# Altium footprint library flight_controller_footprint_lib.PcbLib: 48 footprints (part 3 of 3)
Each footprint in its own frame and in the unit in brackets; x right, y up, seen from the top. Pads: shape width x height; smd on the part's side, far side on the other; paste and mask are expansions set on the pad; w line width, h text height; cw(c..) or ccw(c..) is an arc to the next point about the centre after c.
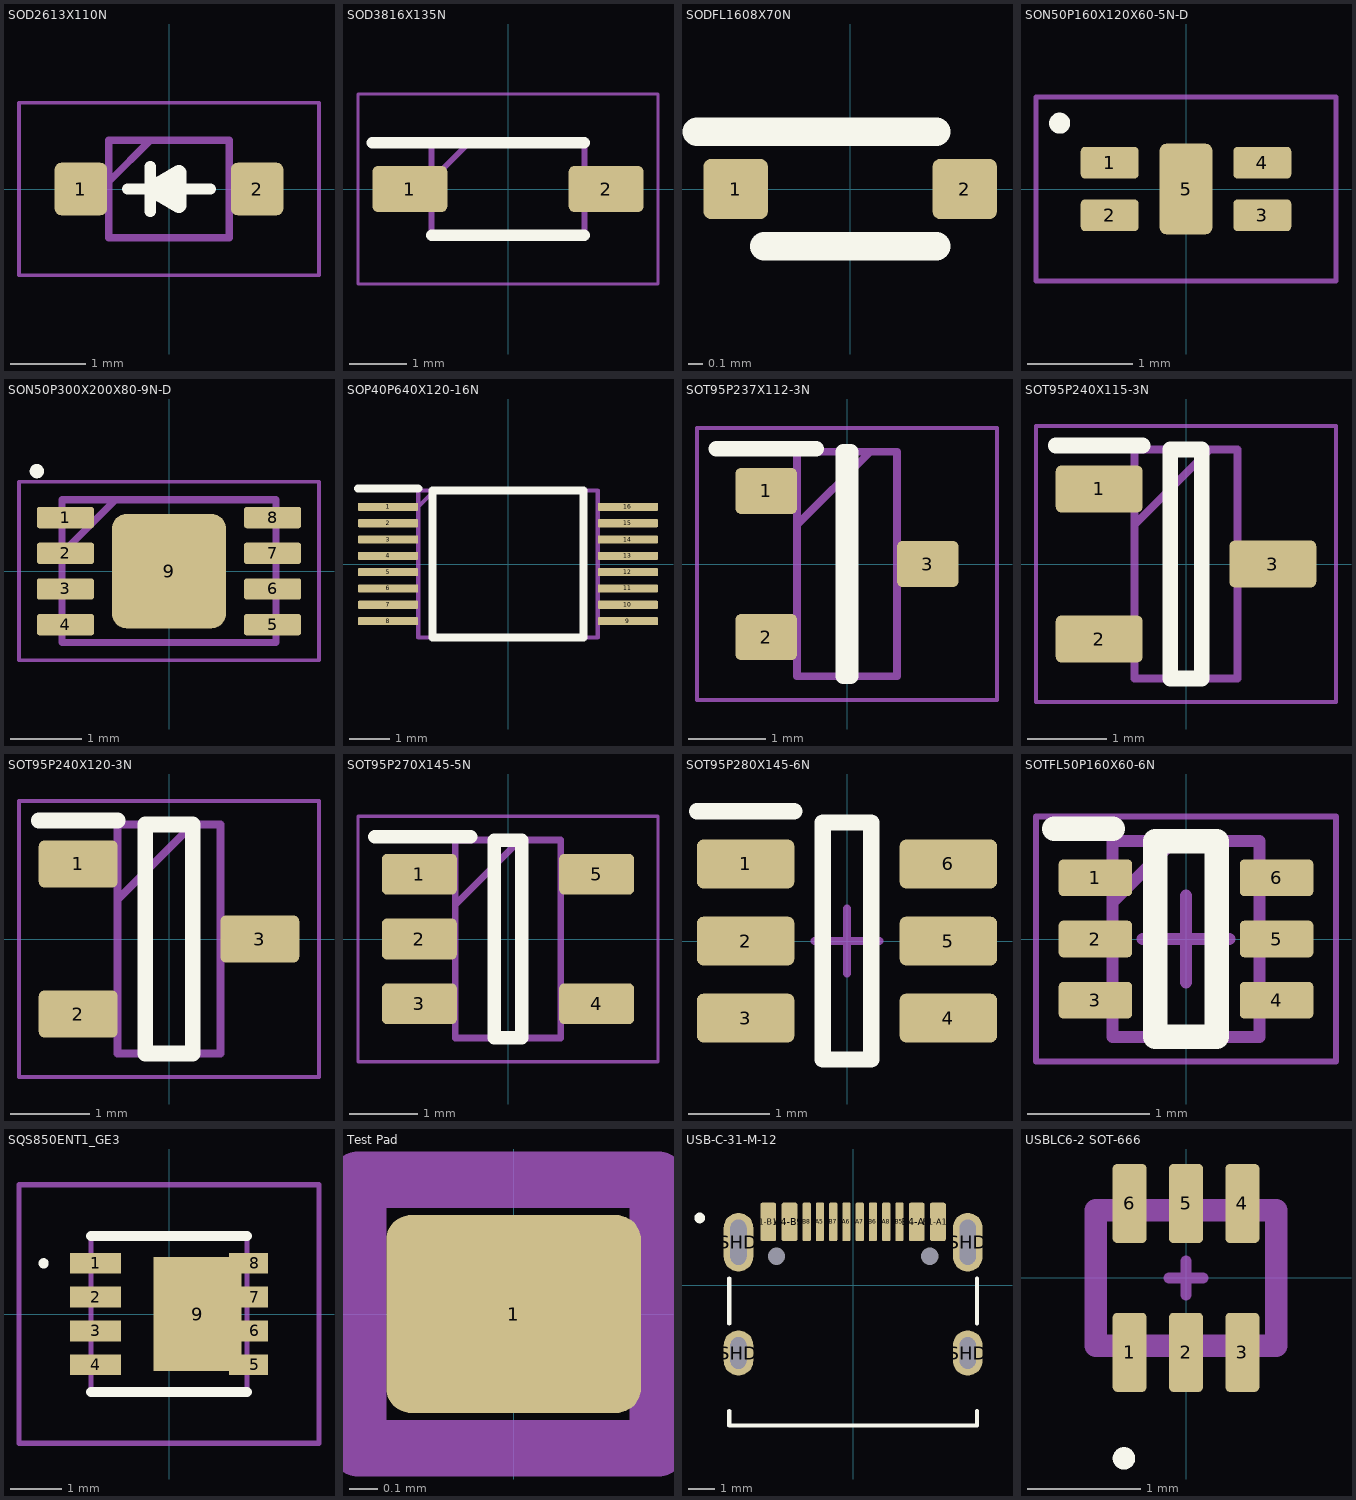
[diagram p2: the footprints below, top view; thin cyan lines are the x and y axes]

## SOD2613X110N [mm]
pads (2):
  rrect25% 0.7x0.7 smd: 1(-1.175,0) 2(1.175,0)
Top Overlay:
  lines w0.15: -0.55,0 0.55,0 ; -0.25,-0.3 -0.25,0.3
  lines w0.2: -0.25,0 0.137,0.223 0.137,-0.223 -0.25,0
Top Assembly:
  lines w0.1: -0.8,0.1 -0.25,0.65 ; -0.8,-0.65 0.8,-0.65 0.8,0.65 -0.8,0.65 -0.8,-0.65
Top Courtyard:
  lines w0.05: -2,-1.15 -2,1.15 2,1.15 2,-1.15 -2,-1.15
Top Designator:
  text ".Designator" at -3.749,-0.25 h0.75
3D body "1N5817WS.stp": height 1.1, standoff 0, extent -1.325,-0.65 1.325,0.65

## SOD3816X135N [mm]
pads (2):
  rrect25% 1.3x0.8 smd: 1(-1.7,0) 2(1.7,0)
Top Overlay:
  lines w0.2: -2.35,0.8 1.325,0.8 ; -1.325,-0.8 1.325,-0.8
Top Assembly:
  lines w0.1: -1.325,0.15 -0.675,0.8 ; -1.325,-0.8 1.325,-0.8 1.325,0.8 -1.325,0.8 -1.325,-0.8
Top Courtyard:
  lines w0.05: -2.6,-1.65 2.6,-1.65 2.6,1.65 -2.6,1.65 -2.6,-1.65
Top Designator:
  text ".Designator" at -3.749,-0.25 h0.75
3D body "1N4148W_R2_00001.stp": height 1.35, standoff 0, extent -1.875,-0.8 1.875,0.8

## SODFL1608X70N [mm]
pads (2):
  rrect25% 0.45x0.42 smd: 1(-0.8,0) 2(0.8,0)
Top Overlay:
  lines w0.2: -1.07,0.4 0.6,0.4 ; -0.6,-0.4 0.6,-0.4
Top Designator:
  text ".Designator" at -3.749,-0.25 h0.75
3D body "1N4148WT.stp": height 0.7, standoff 0, extent -0.8,-0.4 0.8,0.4

## SON50P160X120X60-5N-D [mm]
pads (5):
  rrect25% 0.55x0.3 smd: 1(-0.725,0.25) 2(-0.725,-0.25) 3(0.725,-0.25) 4(0.725,0.25)
  rrect25% 0.5x0.86 smd: 5(0,0)
Top Overlay:
  circle w0.1: c-1.2,0.625 r0.05
Top Courtyard:
  lines w0.05: -1.425,-0.875 -1.425,0.875 1.425,0.875 1.425,-0.875 -1.425,-0.875
Top Designator:
  text ".Designator" at -3.749,-0.25 h0.75
3D body "SIP32431DNP3-T1GE4.stp": height 0.6, standoff 0, extent -0.8,-0.6 0.8,0.6

## SON50P300X200X80-9N-D [mm]
pads (9):
  rrect25% 0.8x0.3 smd: 1(-1.45,0.75) 2(-1.45,0.25) 3(-1.45,-0.25) 4(-1.45,-0.75) 5(1.45,-0.75) 6(1.45,-0.25) 7(1.45,0.25) 8(1.45,0.75)
  rrect25% 1.6x1.6 smd: 9(0,0)
Top Overlay:
  circle w0.1: c-1.85,1.4 r0.05
Top Assembly:
  lines w0.1: -1.5,0.25 -0.75,1 ; -1.5,-1 1.5,-1 1.5,1 -1.5,1 -1.5,-1
Top Courtyard:
  lines w0.05: -2.1,-1.25 -2.1,1.25 2.1,1.25 2.1,-1.25 -2.1,-1.25
Top Designator:
  text ".Designator" at -3.749,-0.137 h0.75
3D body "24AA64FT-I_MNY.stp": height 0.8, standoff 0, extent -1.55,-1 1.55,1

## SOP40P640X120-16N [mm]
pads (16):
  rrect25% 1.475x0.2 smd: 1(-2.938,1.4) 2(-2.938,1) 3(-2.938,0.6) 4(-2.938,0.2) 5(-2.938,-0.2) 6(-2.938,-0.6) 7(-2.938,-1) 8(-2.938,-1.4) 9(2.938,-1.4) 10(2.938,-1) 11(2.938,-0.6) 12(2.938,-0.2) 13(2.938,0.2) 14(2.938,0.6) 15(2.938,1) 16(2.938,1.4)
Top Overlay:
  lines w0.2: -3.675,1.85 -2.2,1.85 ; -1.85,-1.8 -1.85,1.8 1.85,1.8 1.85,-1.8 -1.85,-1.8
Top Assembly:
  lines w0.1: -2.2,1.4 -1.8,1.8 ; -2.2,-1.8 -2.2,1.8 2.2,1.8 2.2,-1.8 -2.2,-1.8
Top Designator:
  text ".Designator" at -3.749,-0.25 h0.75
3D body "PCA9534ADGVR.stp": height 1.13, standoff 0, extent -3.2,-1.8 3.2,1.8

## SOT95P237X112-3N [mm]
pads (3):
  rrect25% 0.8x0.6 smd: 1(-1.05,0.95) 2(-1.05,-0.95) 3(1.05,0)
Top Overlay:
  lines w0.2: -1.7,1.5 -0.4,1.5 ; -0.05,-1.46 -0.05,1.46 0.05,1.46 0.05,-1.46 -0.05,-1.46
Top Assembly:
  lines w0.1: -0.65,0.51 0.3,1.46 ; -0.65,-1.46 -0.65,1.46 0.65,1.46 0.65,-1.46 -0.65,-1.46
Top Courtyard:
  lines w0.05: -1.95,-1.77 1.95,-1.77 1.95,1.77 -1.95,1.77 -1.95,-1.77
Top Designator:
  text ".Designator" at -3.749,-0.25 h0.75
3D body "SI2302DDS-T1-GE3.stp": height 1.12, standoff 0, extent -1.185,-1.46 1.185,1.46

## SOT95P240X115-3N [mm]
pads (3):
  rrect25% 1.1x0.6 smd: 1(-1.1,0.95) 2(-1.1,-0.95) 3(1.1,0)
Top Overlay:
  lines w0.2: -1.65,1.5 -0.55,1.5 ; -0.2,-1.45 0.2,-1.45 0.2,1.45 -0.2,1.45 -0.2,-1.45
Top Assembly:
  lines w0.1: -0.65,0.5 0.3,1.45 ; -0.65,-1.45 0.65,-1.45 0.65,1.45 -0.65,1.45 -0.65,-1.45
Top Courtyard:
  lines w0.05: -1.9,-1.75 1.9,-1.75 1.9,1.75 -1.9,1.75 -1.9,-1.75
Top Designator:
  text ".Designator" at -3.749,-0.25 h0.75
3D body "SS8050-HF.stp": height 1.15, standoff 0, extent -1.2,-1.45 1.2,1.45

## SOT95P240X120-3N [mm]
pads (3):
  rrect25% 1x0.6 smd: 1(-1.15,0.95) 2(-1.15,-0.95) 3(1.15,0)
Top Overlay:
  lines w0.2: -1.65,1.5 -0.65,1.5 ; -0.3,-1.45 0.3,-1.45 0.3,1.45 -0.3,1.45 -0.3,-1.45
Top Assembly:
  lines w0.1: -0.65,0.5 0.3,1.45 ; -0.65,-1.45 -0.65,1.45 0.65,1.45 0.65,-1.45 -0.65,-1.45
Top Courtyard:
  lines w0.05: -1.9,-1.75 1.9,-1.75 1.9,1.75 -1.9,1.75 -1.9,-1.75
3D body "BAT54.stp": height 1.1, standoff -0.1, extent -1.2,-1.45 1.2,1.45

## SOT95P270X145-5N [mm]
pads (5):
  rrect25% 1.1x0.6 smd: 1(-1.3,0.95) 2(-1.3,0) 3(-1.3,-0.95) 4(1.3,-0.95) 5(1.3,0.95)
Top Overlay:
  lines w0.2: -1.95,1.5 -0.55,1.5 ; -0.2,-1.45 0.2,-1.45 0.2,1.45 -0.2,1.45 -0.2,-1.45
Top Assembly:
  lines w0.1: -0.775,0.5 0.175,1.45 ; -0.775,-1.45 0.775,-1.45 0.775,1.45 -0.775,1.45 -0.775,-1.45
Top Courtyard:
  lines w0.05: -2.2,-1.8 2.2,-1.8 2.2,1.8 -2.2,1.8 -2.2,-1.8
Top Designator:
  text ".Designator" at -3.749,-0.25 h0.75
3D body "24AA64FT-I_OT.stp": height 1.45, standoff 0, extent -1.35,-1.45 1.35,1.45

## SOT95P280X145-6N [mm]
pads (6):
  rrect25% 1.2x0.6 smd: 1(-1.25,0.95) 2(-1.25,0) 3(-1.25,-0.95) 4(1.25,-0.95) 5(1.25,0) 6(1.25,0.95)
Top Overlay:
  lines w0.2: -1.85,1.6 -0.65,1.6 ; -0.3,-1.462 0.3,-1.462 0.3,1.462 -0.3,1.462 -0.3,-1.462
Top Assembly:
  lines w0.1: -0.4,0 0,0 ; 0,-0.4 0,0 ; 0,0.4 0,0 ; 0.4,0 0,0
Top Designator:
  text ".Designator" at -3.749,-0.181 h0.75
3D body "USBLC6-2SC6.stp": height 1.45, standoff 0, extent -1.4,-1.462 1.4,1.462

## SOTFL50P160X60-6N [mm]
pads (6):
  rrect25% 0.6x0.3 smd: 1(-0.74,0.5) 2(-0.74,0) 3(-0.74,-0.5) 4(0.74,-0.5) 5(0.74,0) 6(0.74,0.5)
Top Overlay:
  lines w0.2: -1.075,0.9 -0.6,0.9 ; -0.25,-0.8 0.25,-0.8 0.25,0.8 -0.25,0.8 -0.25,-0.8
Top Assembly:
  lines w0.1: -0.6,0.3 -0.1,0.8 ; -0.354,0 0.354,0 ; 0,-0.354 0,0.354 ; -0.6,-0.8 -0.6,0.8 0.6,0.8 0.6,-0.8 -0.6,-0.8
Top Courtyard:
  lines w0.05: -1.225,-1 1.225,-1 1.225,1 -1.225,1 -1.225,-1
Top Designator:
  text ".Designator" at -3.749,-0.25 h0.75
3D body "SN74LVC1G3157DRLR.stp": height 0.6, standoff 0, extent -0.8,-0.8 0.8,0.8

## SQS850ENT1_GE3 [mm]
pads (11):
  rect 0.99x0.405 smd: 1(-1.435,0.99) 2(-1.435,0.33) 3(-1.435,-0.33) 4(-1.435,-0.99)
  rect 0.51x0.405 smd: 5(1.675,-0.99) 6(1.675,-0.33) 7(1.675,0.33) 8(1.675,0.99)
  rect 1.725x2.235 smd: 9(0.557,0)
  rect 0.25x0.077 smd: 10(1.295,-1.156) 11(1.295,1.156)
Top Overlay:
  lines w0.1: -2.5,0.99 ccw(c-2.45,0.99) -2.4,0.99 ccw(c-2.45,0.99) -2.5,0.99
  lines w0.2: -1.525,-1.525 1.525,-1.525 ; -1.525,1.525 1.525,1.525
Top Assembly:
  lines w0.1: -1.525,-1.525 1.525,-1.525 1.525,1.525 -1.525,1.525 -1.525,-1.525
Top Courtyard:
  lines w0.1: -2.93,-2.525 2.93,-2.525 2.93,2.525 -2.93,2.525 -2.93,-2.525
Top Designator:
  text ".Designator" at -3.749,-0.25 h0.75
3D body "SISH615ADN-T1-GE3.stp": height 1.17, standoff 0, extent -1.65,-1.65 1.65,1.65

## Test Pad [mm] "Size of 1005[0402] resistor pad size"
height 0.4
pads (1):
  rrect25% 0.9x0.7 smd paste-2539.97: 1(0,0)
Top Assembly:
  lines w0.2: -0.55,-0.475 0.51,-0.475 0.51,0.475 -0.55,0.475 -0.55,-0.475

## USB-C-31-M-12 [mm]
pads (18):
  round 0 hole 0.65: 17(-2.89,1.102) 18(2.89,1.102)
  rrect25% 0.6x1.448 smd paste+0 mask+0.1: A1-B12(-3.2,2.4) A4-B9(-2.4,2.4) B1-A12(3.2,2.4) B4-A9(2.4,2.4)
  rrect25% 0.305x1.448 smd paste+0 mask+0.1: A5(-1.25,2.4) A6(-0.25,2.4) A7(0.25,2.4) A8(1.25,2.4) B5(1.75,2.4) B6(0.75,2.4) B7(-0.75,2.4) B8(-1.75,2.4)
  oval 1.118x1.702 hole 0.61 slot 1.194 at 90 deg: SHD(-4.325,-2.548) SHD(4.325,-2.548)
  oval 1.118x2.21 hole 0.61 slot 1.702 at 90 deg: SHD(-4.325,1.632) SHD(4.325,1.632)
Top Overlay:
  circle w0.2: c-5.79,2.548 r0.1
  lines w0.152: -4.674,-4.73 -4.674,-5.275 4.674,-5.275 4.674,-4.73 ; -4.674,-1.437 -4.674,0.267 ; 4.674,-1.437 4.674,0.267
Top Designator:
  text ".Designator" at -4.251,-1.314 h0.75
3D body "TYPE-C-31-M-12--3DModel-STEP-56544.STEP": height 3.31, standoff -0.99, extent -4.47,-5.15 4.47,2.755

## USBLC6-2 SOT-666 [mm]
pads (6):
  rrect25% 0.3x0.7 smd: 1(-0.5,-0.66) 2(0,-0.66) 3(0.5,-0.66) 4(0.5,0.66) 5(0,0.66) 6(-0.5,0.66)
Top Overlay:
  lines w0.1: -0.6,-1.6 cw(c-0.55,-1.6) -0.5,-1.6 cw(c-0.55,-1.6) -0.6,-1.6
Top Assembly:
  lines w0.1: -0.15,0 0.15,0 ; 0,-0.15 0,0.15
  lines w0.2: -0.8,-0.6 -0.8,0.6 0.8,0.6 0.8,-0.6 -0.8,-0.6
Top Designator:
  text ".Designator" at -3.749,-0.544 h0.75
3D body "USBLC6-2P6.stp": height 0.46, standoff 0, extent -0.75,-0.75 0.75,0.75